# Altium schematic symbol library Trans_ETD29_3.SchLib: 1 symbol
Pins are listed as number, name and electrical type; pins without a type are passive.

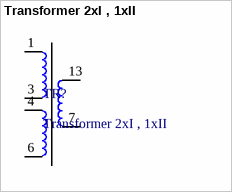
[diagram p0: symbol Transformer 2xI , 1xII]

## Transformer 2xI , 1xII
designator TR?
footprint TRANS_ETD_29
pins: 1, 3, 4, 6, 7, 13